# Altium footprint library FootPrintLib_11.PcbLib: 376 footprints (part 4 of 24)
Each footprint in its own frame and in the unit in brackets; x right, y up, seen from the top. Pads: shape width x height; smd on the part's side, far side on the other; paste and mask are expansions set on the pad; w line width, h text height; cw(c..) or ccw(c..) is an arc to the next point about the centre after c.
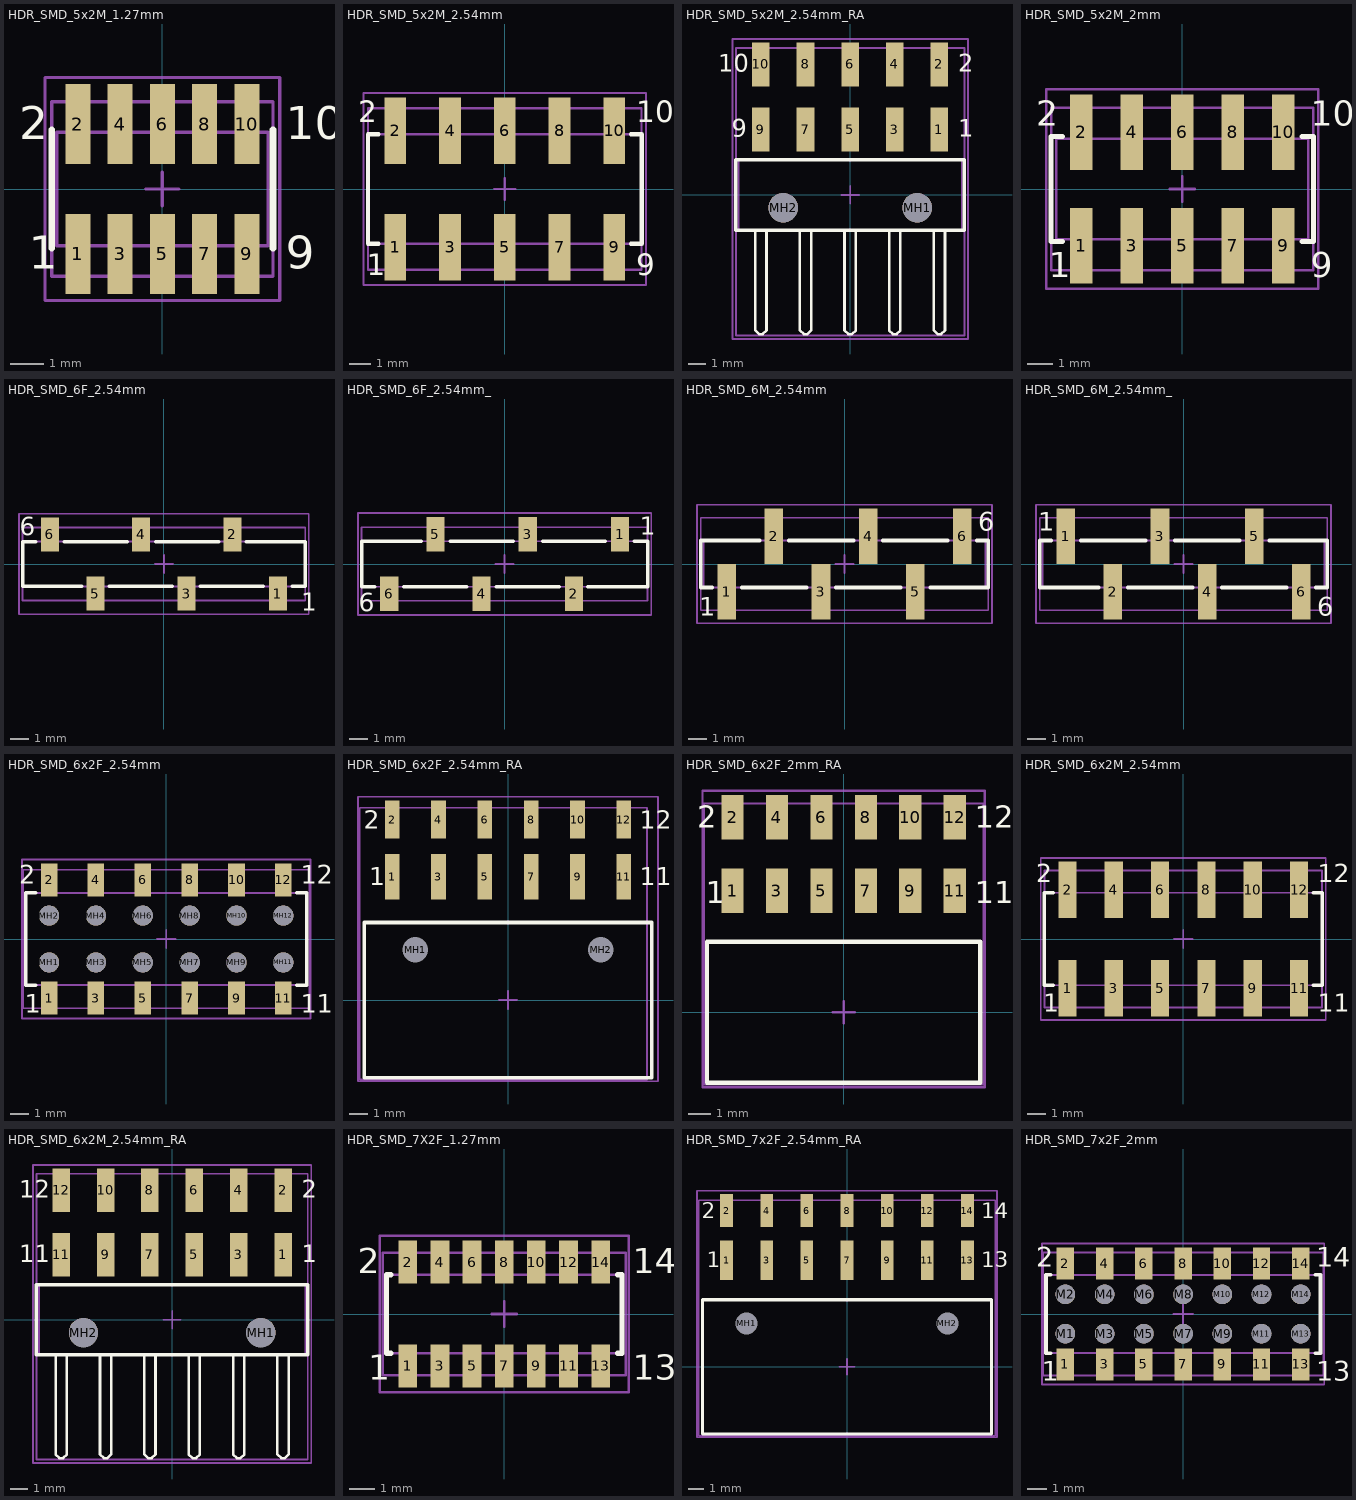
[diagram p3: the footprints below, top view; thin cyan lines are the x and y axes]

## HDR_SMD_5x2M_1.27mm [mm] "Pin Header, pitch 1.27 mm, SMD, Vertical, dual row, 10p"
height 6.55
pads (10):
  rect 0.75x2.4 smd: 1(-2.54,-1.95) 2(-2.54,1.95) 3(-1.27,-1.95) 4(-1.27,1.95) 5(0,-1.95) 6(0,1.95) 7(1.27,-1.95) 8(1.27,1.95) 9(2.54,-1.95) 10(2.54,1.95)
Top Overlay:
  lines w0.2: -3.325,-1.775 -3.325,1.775 ; 3.325,-1.775 3.325,1.775
  text "2" at -4.305,1.5 h1
  text "1" at -4.005,-2.4 h1
  text "9" at 3.705,-2.4 h1
  text "10" at 3.705,1.5 h1
Mechanical 11:
  lines w0.1: -3.175,-1.7 3.175,-1.7 3.175,1.7 -3.175,1.7 -3.175,-1.7
Mechanical 13:
  lines w0.1: -3.325,-2.625 -3.325,2.625 3.325,2.625 3.325,-2.625 -3.325,-2.625
Mechanical 15:
  lines w0.1: -0.5,0 0.5,0 ; 0,-0.5 0,0.5 ; -3.525,-3.35 3.525,-3.35 3.525,3.35 -3.525,3.35 -3.525,-3.35
3D body "62101021021.stp": height 5.9, standoff -0.01, extent -3.175,-2.5 3.175,2.5

## HDR_SMD_5x2M_2.54mm [mm] "Pin Header, pitch 2.54 mm, SMD, Vertical, dual row, 10p"
height 9.6
pads (10):
  rect 1x3.1 smd: 1(-5.08,-2.7) 2(-5.08,2.7) 3(-2.54,-2.7) 4(-2.54,2.7) 5(0,-2.7) 6(0,2.7) 7(2.54,-2.7) 8(2.54,2.7) 9(5.08,-2.7) 10(5.08,2.7)
Top Overlay:
  lines w0.2: -5.86,-2.54 -6.35,-2.54 -6.35,2.54 -5.86,2.54 ; 5.86,-2.54 6.35,-2.54 6.35,2.54 5.86,2.54
  text "10" at 6.11,3.1 h1
  text "9" at 6.11,-4 h1
  text "1" at -6.41,-4 h1
  text "2" at -6.81,3.1 h1
Mechanical 11:
  lines w0.1: -6.35,-2.54 6.35,-2.54 6.35,2.54 -6.35,2.54 -6.35,-2.54
Mechanical 13:
  lines w0.1: -6.35,-3.75 -6.35,3.75 6.35,3.75 6.35,-3.75 -6.35,-3.75
Mechanical 15:
  lines w0.1: -0.5,0 0.5,0 ; 0,-0.5 0,0.5 ; -6.55,-4.45 -6.55,4.45 6.55,4.45 6.55,-4.45 -6.55,-4.45
3D body "61001021121.stp": height 9.62, standoff 0.02, extent -6.35,-3.75 6.35,3.75

## HDR_SMD_5x2M_2.54mm_RA [mm] "Pin Header, pitch 2.54 mm, SMD, Angled, dual row, 10p"
height 5.08
pads (12):
  rect 1x2.5 smd: 1(5.08,3.72) 2(5.08,7.42) 3(2.54,3.72) 4(2.54,7.42) 5(0,3.72) 6(0,7.42) 7(-2.54,3.72) 8(-2.54,7.42) 9(-5.08,3.72) 10(-5.08,7.42)
  round 1.68 hole 1.68 unplated: MH1(3.81,-0.73) MH2(-3.81,-0.73)
Top Overlay:
  lines w0.15: -5.4,-2 -5.4,-7.3 -5.4,-7.58 -5.4,-7.705 -5.18,-7.925 -4.98,-7.925 -4.76,-7.705 -4.76,-7.58 -4.76,-7.3 -4.76,-2 ; -2.86,-2 -2.86,-7.3 -2.86,-7.58 -2.86,-7.705 -2.64,-7.925 -2.44,-7.925 -2.22,-7.705 -2.22,-7.58 -2.22,-7.3 -2.22,-2 ; -0.32,-2 -0.32,-7.3 -0.32,-7.58 -0.32,-7.705 -0.1,-7.925 0.1,-7.925 0.32,-7.705 0.32,-7.58 0.32,-7.3 0.32,-2 ; 2.22,-2 2.22,-7.3 2.22,-7.58 2.22,-7.705 2.44,-7.925 2.64,-7.925 2.86,-7.705 2.86,-7.58 2.86,-7.3 2.86,-2 ; 4.76,-2 4.76,-7.3 4.76,-7.58 4.76,-7.705 4.98,-7.925 5.18,-7.925 5.4,-7.705 5.4,-7.58 5.4,-7.3 5.4,-2
  lines w0.2: -6.5,-2 6.5,-2 6.5,2 -6.5,2 -6.5,-2
  text "1" at 6.14,3.3 h1
  text "2" at 6.14,7 h1
  text "10" at -7.5,7 h1
  text "9" at -6.74,3.3 h1
Mechanical 11:
  lines w0.1: -6.35,-2 6.35,-2 6.35,2 -6.35,2 -6.35,-2
Mechanical 13:
  lines w0.1: -6.5,-8 6.5,-8 6.5,8.36 -6.5,8.36 -6.5,-8
Mechanical 15:
  lines w0.1: -0.5,0 0.5,0 ; 0,-0.5 0,0.5 ; -6.7,-8.2 -6.7,8.87 6.7,8.87 6.7,-8.2 -6.7,-8.2
3D body "610110249121.stp": height 5.1, standoff -1.38, extent -6.35,-8 6.35,8.16

## HDR_SMD_5x2M_2mm [mm] "Pin Header, pitch 2.00 mm, SMD, Vertical, dual row, 10p"
height 6.8
pads (10):
  rect 0.89x3 smd: 1(-4,-2.25) 2(-4,2.25) 3(-2,-2.25) 4(-2,2.25) 5(0,-2.25) 6(0,2.25) 7(2,-2.25) 8(2,2.25) 9(4,-2.25) 10(4,2.25)
Top Overlay:
  lines w0.2: -4.75,-2.075 -5.2,-2.075 -5.2,2.075 -4.75,2.075 ; 4.75,-2.075 5.2,-2.075 5.2,2.075 4.75,2.075
  text "9" at 5.1,-3.5 h1
  text "10" at 5.1,2.5 h1
  text "1" at -5.3,-3.5 h1
  text "2" at -5.8,2.5 h1
Mechanical 11:
  lines w0.1: -5,-2 5,-2 5,2 -5,2 -5,-2
Mechanical 13:
  lines w0.1: -5.2,-3.225 -5.2,3.225 5.2,3.225 5.2,-3.225 -5.2,-3.225
Mechanical 15:
  lines w0.1: -0.5,0 0.5,0 ; 0,-0.5 0,0.5 ; -5.4,-3.95 -5.4,3.95 5.4,3.95 5.4,-3.95 -5.4,-3.95
3D body "62101021921.stp": height 6.7, standoff 0, extent -5,-3.1 5,3.1

## HDR_SMD_6F_2.54mm [mm] "Socket Header, Pitch 2.54 mm, SMT, Vertical, single row, 6p"
height 7.5
pads (6):
  rect 1x1.91 smd: 1(6.35,-1.645) 2(3.81,1.645) 3(1.27,-1.645) 4(-1.27,1.645) 5(-3.81,-1.645) 6(-6.35,1.645)
Top Overlay:
  lines w0.2: -7.14,1.25 -7.87,1.25 -7.87,-1.25 -4.59,-1.25 ; -5.54,1.25 -2.04,1.25 ; -3.04,-1.25 0.46,-1.25 ; -0.46,1.25 3.04,1.25 ; 2.04,-1.25 5.54,-1.25 ; 4.59,1.25 7.87,1.25 7.87,-1.25 7.14,-1.25
  text "1" at 7.64,-2.6 h1
  text "6" at -8.04,1.6 h1
Mechanical 11:
  lines w0.1: -7.87,-1.25 -7.87,1.25 7.87,1.25 7.87,-1.25 -7.87,-1.25
Mechanical 13:
  lines w0.1: -7.87,-2.025 -7.87,2.025 7.87,2.025 7.87,-2.025 -7.87,-2.025
Mechanical 15:
  lines w0.1: -0.5,0 0.5,0 ; 0,-0.5 0,0.5 ; -8.07,-2.8 -8.07,2.8 8.07,2.8 8.07,-2.8 -8.07,-2.8
3D body "61000611921.stp": height 7.5, standoff 0, extent -7.87,-2.025 7.87,2.025

## HDR_SMD_6F_2.54mm_ [mm] "Socket Header, Pitch 2.54 mm, SMT, Vertical, single row, 6p"
height 7.5
pads (6):
  rect 1x1.91 smd: 1(6.35,1.645) 2(3.81,-1.645) 3(1.27,1.645) 4(-1.27,-1.645) 5(-3.81,1.645) 6(-6.35,-1.645)
Top Overlay:
  lines w0.2: -7.14,-1.25 -7.87,-1.25 -7.87,1.25 -4.59,1.25 ; -5.54,-1.25 -2.09,-1.25 ; -2.99,1.25 0.46,1.25 ; -0.46,-1.25 2.99,-1.25 ; 2.09,1.25 5.54,1.25 ; 4.59,-1.25 7.87,-1.25 7.87,1.25 7.14,1.25
  text "6" at -8.04,-2.6 h1
  text "1" at 7.44,1.6 h1
Mechanical 11:
  lines w0.1: -7.87,-1.25 -7.87,1.25 7.87,1.25 7.87,-1.25 -7.87,-1.25
Mechanical 13:
  lines w0.1: -7.87,-2.025 7.87,-2.025 7.87,2.025 -7.87,2.025 -7.87,-2.025
Mechanical 15:
  lines w0.1: -0.5,0 0.5,0 ; 0,-0.5 0,0.5 ; -8.07,-2.8 8.07,-2.8 8.07,2.8 -8.07,2.8 -8.07,-2.8
3D body "61000613321.stp": height 7.5, standoff 0, extent -7.87,-2.025 7.87,2.025

## HDR_SMD_6M_2.54mm [mm] "Pin Header, pitch 2.54 mm, SMD, Vertical, single row, 6p"
height 9.3
pads (6):
  rect 1x3 smd: 1(-6.35,-1.5) 2(-3.81,1.5) 3(-1.27,-1.5) 4(1.27,1.5) 5(3.81,-1.5) 6(6.35,1.5)
Top Overlay:
  lines w0.2: -7.14,-1.27 -7.77,-1.27 -7.77,1.27 -4.59,1.27 ; -5.54,-1.27 -2.04,-1.27 ; -3,1.27 0.5,1.27 ; -0.46,-1.27 3.04,-1.27 ; 2.08,1.27 5.58,1.27 ; 4.64,-1.27 7.77,-1.27 7.77,1.27 7.14,1.27
  text "1" at -7.84,-2.8 h1
  text "6" at 7.24,1.8 h1
Mechanical 11:
  lines w0.1: -7.62,-1.27 -7.62,1.27 7.62,1.27 7.62,-1.27 -7.62,-1.27
Mechanical 13:
  lines w0.1: -7.77,-2.5 7.77,-2.5 7.77,2.5 -7.77,2.5 -7.77,-2.5
Mechanical 15:
  lines w0.1: -0.5,0 0.5,0 ; 0,-0.5 0,0.5 ; -7.97,-3.2 7.97,-3.2 7.97,3.2 -7.97,3.2 -7.97,-3.2
3D body "61000618221.stp": height 9.33, standoff 0, extent -7.62,-2.5 7.62,2.5

## HDR_SMD_6M_2.54mm_ [mm] "Pin Header, pitch 2.54 mm, SMD, Vertical, single row, 6p"
height 9.3
pads (6):
  rect 1x3 smd: 1(-6.35,1.5) 2(-3.81,-1.5) 3(-1.27,1.5) 4(1.27,-1.5) 5(3.81,1.5) 6(6.35,-1.5)
Top Overlay:
  lines w0.2: -7.14,1.27 -7.77,1.27 -7.77,-1.27 -4.59,-1.27 ; -5.54,1.27 -2.04,1.27 ; -3,-1.27 0.5,-1.27 ; -0.46,1.27 3.04,1.27 ; 2.08,-1.27 5.58,-1.27 ; 4.64,1.27 7.77,1.27 7.77,-1.27 7.14,-1.27
  text "6" at 7.24,-2.8 h1
  text "1" at -7.84,1.8 h1
Mechanical 11:
  lines w0.1: -7.62,-1.27 -7.62,1.27 7.62,1.27 7.62,-1.27 -7.62,-1.27
Mechanical 13:
  lines w0.1: -7.77,-2.5 7.77,-2.5 7.77,2.5 -7.77,2.5 -7.77,-2.5
Mechanical 15:
  lines w0.1: -0.5,0 0.5,0 ; 0,-0.5 0,0.5 ; -7.97,-3.2 7.97,-3.2 7.97,3.2 -7.97,3.2 -7.97,-3.2
3D body "61000618321.stp": height 9.37, standoff 0.04, extent -7.62,-2.5 7.62,2.5

## HDR_SMD_6x2F_2.54mm [mm] "Socket Header, Pitch 2.54 mm, SMT, Vertical, dual row, 12p"
height 3.7
pads (24):
  rect 0.9x1.8 smd: 1(-6.35,-3.2) 2(-6.35,3.2) 3(-3.81,-3.2) 4(-3.81,3.2) 5(-1.27,-3.2) 6(-1.27,3.2) 7(1.27,-3.2) 8(1.27,3.2) 9(3.81,-3.2) 10(3.81,3.2) 11(6.35,-3.2) 12(6.35,3.2)
  round 1.1 hole 1.1 unplated: MH1(-6.35,-1.27) MH2(-6.35,1.27) MH3(-3.81,-1.27) MH4(-3.81,1.27) MH5(-1.27,-1.27) MH6(-1.27,1.27) MH7(1.27,-1.27) MH8(1.27,1.27) MH9(3.81,-1.27) MH10(3.81,1.27) MH11(6.35,-1.27) MH12(6.35,1.27)
Top Overlay:
  lines w0.2: -7.08,-2.5 -7.62,-2.5 -7.62,2.5 -7.08,2.5 ; 7.08,-2.5 7.62,-2.5 7.62,2.5 7.08,2.5
  text "11" at 7.28,-4 h1
  text "12" at 7.28,3 h1
  text "1" at -7.68,-4 h1
  text "2" at -7.98,3 h1
Mechanical 11:
  lines w0.1: -7.62,-2.5 -7.62,2.5 7.62,2.5 7.62,-2.5 -7.62,-2.5
Mechanical 13:
  lines w0.1: -7.77,-3.75 -7.77,3.75 7.77,3.75 7.77,-3.75 -7.77,-3.75
Mechanical 15:
  lines w0.1: -0.5,0 0.5,0 ; 0,-0.5 0,0.5 ; -7.82,-4.3 -7.82,4.3 7.82,4.3 7.82,-4.3 -7.82,-4.3
3D body "610012243021.stp": height 3.7, standoff 0, extent -7.62,-3.603 7.62,3.603

## HDR_SMD_6x2F_2.54mm_RA [mm] "Socket Header, Pitch 2.54 mm, SMT, Angled, dual row, 12p"
height 5.2
pads (14):
  rect 0.8x2.5 smd: 1(-6.35,6.76) 3(-3.81,6.76) 5(-1.27,6.76) 7(1.27,6.76) 9(3.81,6.76) 11(6.35,6.76)
  rect 0.8x2.1 smd: 2(-6.35,9.89) 4(-3.81,9.89) 6(-1.27,9.89) 8(1.27,9.89) 10(3.81,9.89) 12(6.35,9.89)
  round 1.3 hole 1.4 unplated: MH1(-5.08,2.75) MH2(5.08,2.75)
Top Overlay:
  lines w0.2: -7.87,-4.25 -7.87,4.25 7.87,4.25 7.87,-4.25 -7.87,-4.25
  text "2" at -7.91,9.4 h1
  text "1" at -7.61,6.3 h1
  text "11" at 7.21,6.3 h1
  text "12" at 7.21,9.4 h1
Mechanical 11:
  lines w0.1: -7.87,-4.25 -7.87,4.25 7.87,4.25 7.87,-4.25 -7.87,-4.25
Mechanical 13:
  lines w0.1: -8.12,-4.35 -8.12,10.54 7.62,10.54 7.62,-4.35 -8.12,-4.35
Mechanical 15:
  lines w0.1: -0.5,0 0.5,0 ; 0,-0.5 0,0.5 ; -8.22,-4.45 -8.22,11.14 8.22,11.14 8.22,-4.45 -8.22,-4.45
3D body "610112249221.stp": height 5.03, standoff -1.27, extent -7.87,-4.25 7.87,10.44

## HDR_SMD_6x2F_2mm_RA [mm] "Socket Header, Pitch 2.00 mm, SMT, Angled, dual row, 12p"
height 4.15
pads (12):
  rect 1x2 smd: 1(-5,5.475) 2(-5,8.775) 3(-3,5.475) 4(-3,8.775) 5(-1,5.475) 6(-1,8.775) 7(1,5.475) 8(1,8.775) 9(3,5.475) 10(3,8.775) 11(5,5.475) 12(5,8.775)
Top Overlay:
  lines w0.2: -6.15,-3.175 -6.15,3.175 6.15,3.175 6.15,-3.175 -6.15,-3.175
  text "1" at -6.2,4.9 h1
  text "2" at -6.6,8.3 h1
  text "12" at 5.9,8.3 h1
  text "11" at 5.9,4.9 h1
Mechanical 11:
  lines w0.1: -6.15,-3.175 6.15,-3.175 6.15,3.175 -6.15,3.175 -6.15,-3.175
Mechanical 13:
  lines w0.1: -6.3,-3.25 -6.3,9.4 6.3,9.4 6.3,-3.25 -6.3,-3.25
Mechanical 15:
  lines w0.1: -0.5,0 0.5,0 ; 0,-0.5 0,0.5 ; -6.35,-3.375 6.35,-3.375 6.35,9.975 -6.35,9.975 -6.35,-3.375
3D body "621112284621.stp": height 4.05, standoff 0.05, extent -6.15,-3.175 6.15,9.275

## HDR_SMD_6x2M_2.54mm [mm] "Pin Header, pitch 2.54 mm, SMD, Vertical, dual row, 12p"
height 9.6
pads (12):
  rect 1x3.1 smd: 1(-6.35,-2.7) 2(-6.35,2.7) 3(-3.81,-2.7) 4(-3.81,2.7) 5(-1.27,-2.7) 6(-1.27,2.7) 7(1.27,-2.7) 8(1.27,2.7) 9(3.81,-2.7) 10(3.81,2.7) 11(6.35,-2.7) 12(6.35,2.7)
Top Overlay:
  lines w0.2: -7.13,-2.54 -7.62,-2.54 -7.62,2.54 -7.13,2.54 ; 7.13,-2.54 7.62,-2.54 7.62,2.54 7.13,2.54
  text "12" at 7.38,3.1 h1
  text "11" at 7.38,-4 h1
  text "1" at -7.68,-4 h1
  text "2" at -8.08,3.1 h1
Mechanical 11:
  lines w0.1: -7.62,-2.54 7.62,-2.54 7.62,2.54 -7.62,2.54 -7.62,-2.54
Mechanical 13:
  lines w0.1: -7.62,-3.75 -7.62,3.75 7.62,3.75 7.62,-3.75 -7.62,-3.75
Mechanical 15:
  lines w0.1: -0.5,0 0.5,0 ; 0,-0.5 0,0.5 ; -7.82,-4.45 -7.82,4.45 7.82,4.45 7.82,-4.45 -7.82,-4.45
3D body "61001221121.stp": height 9.62, standoff 0.02, extent -7.62,-3.75 7.62,3.75

## HDR_SMD_6x2M_2.54mm_RA [mm] "Pin Header, pitch 2.54 mm, SMD, Angled, dual row, 12p"
height 5.08
pads (14):
  rect 1x2.5 smd: 1(6.35,3.72) 2(6.35,7.42) 3(3.81,3.72) 4(3.81,7.42) 5(1.27,3.72) 6(1.27,7.42) 7(-1.27,3.72) 8(-1.27,7.42) 9(-3.81,3.72) 10(-3.81,7.42) 11(-6.35,3.72) 12(-6.35,7.42)
  round 1.68 hole 1.68 unplated: MH1(5.08,-0.73) MH2(-5.08,-0.73)
Top Overlay:
  lines w0.15: -6.67,-2 -6.67,-7.3 -6.67,-7.58 -6.67,-7.705 -6.45,-7.925 -6.25,-7.925 -6.03,-7.705 -6.03,-7.58 -6.03,-7.3 -6.03,-2 ; -4.13,-2 -4.13,-7.3 -4.13,-7.58 -4.13,-7.705 -3.91,-7.925 -3.71,-7.925 -3.49,-7.705 -3.49,-7.58 -3.49,-7.3 -3.49,-2 ; -1.59,-2 -1.59,-7.3 -1.59,-7.58 -1.59,-7.705 -1.37,-7.925 -1.17,-7.925 -0.95,-7.705 -0.95,-7.58 -0.95,-7.3 -0.95,-2 ; 0.95,-2 0.95,-7.3 0.95,-7.58 0.95,-7.705 1.17,-7.925 1.37,-7.925 1.59,-7.705 1.59,-7.58 1.59,-7.3 1.59,-2 ; 3.49,-2 3.49,-7.3 3.49,-7.58 3.49,-7.705 3.71,-7.925 3.91,-7.925 4.13,-7.705 4.13,-7.58 4.13,-7.3 4.13,-2 ; 6.03,-2 6.03,-7.3 6.03,-7.58 6.03,-7.705 6.25,-7.925 6.45,-7.925 6.67,-7.705 6.67,-7.58 6.67,-7.3 6.67,-2
  lines w0.2: -7.77,-2 7.77,-2 7.77,2 -7.77,2 -7.77,-2
  text "1" at 7.41,3.3 h1
  text "2" at 7.41,7 h1
  text "11" at -8.77,3.3 h1
  text "12" at -8.77,7 h1
Mechanical 11:
  lines w0.1: -7.62,-2 7.62,-2 7.62,2 -7.62,2 -7.62,-2
Mechanical 13:
  lines w0.1: -7.77,-8 7.77,-8 7.77,8.36 -7.77,8.36 -7.77,-8
Mechanical 15:
  lines w0.1: -0.5,0 0.5,0 ; 0,-0.5 0,0.5 ; -7.97,-8.2 -7.97,8.87 7.97,8.87 7.97,-8.2 -7.97,-8.2
3D body "610112249121.stp": height 5.1, standoff -1.38, extent -7.62,-8 7.62,8.16

## HDR_SMD_7X2F_1.27mm [mm] "Socket Header, Pitch 1.27 mm, SMT, Vertical, dual row, 14p"
height 4.7
pads (14):
  rect 0.74x1.7 smd: 1(-3.81,-2.05) 2(-3.81,2.05) 3(-2.54,-2.05) 4(-2.54,2.05) 5(-1.27,-2.05) 6(-1.27,2.05) 7(0,-2.05) 8(0,2.05) 9(1.27,-2.05) 10(1.27,2.05) 11(2.54,-2.05) 12(2.54,2.05) 13(3.81,-2.05) 14(3.81,2.05)
Top Overlay:
  lines w0.2: -4.475,-1.55 -4.645,-1.55 -4.645,1.55 -4.475,1.55 ; 4.475,-1.55 4.645,-1.55 4.645,1.55 4.475,1.55
  text "1" at -5.375,-2.6 h1
  text "2" at -5.775,1.6 h1
  text "13" at 5.075,-2.6 h1
  text "14" at 5.075,1.6 h1
Mechanical 11:
  lines w0.1: -4.645,-1.55 4.645,-1.55 4.645,1.55 -4.645,1.55 -4.645,-1.55
Mechanical 13:
  lines w0.1: -4.795,-2.425 -4.795,2.425 4.795,2.425 4.795,-2.425 -4.795,-2.425
Mechanical 15:
  lines w0.1: -0.5,0 0.5,0 ; 0,-0.5 0,0.5 ; -4.925,-3.1 -4.925,3.1 4.925,3.1 4.925,-3.1 -4.925,-3.1
3D body "62301421021.stp": height 4.6, standoff 0, extent -4.645,-2.299 4.645,2.299

## HDR_SMD_7x2F_2.54mm_RA [mm] "Socket Header, Pitch 2.54 mm, SMT, Angled, dual row, 14p"
height 5.2
pads (16):
  rect 0.8x2.5 smd: 1(-7.62,6.76) 3(-5.08,6.76) 5(-2.54,6.76) 7(0,6.76) 9(2.54,6.76) 11(5.08,6.76) 13(7.62,6.76)
  rect 0.8x2.1 smd: 2(-7.62,9.89) 4(-5.08,9.89) 6(-2.54,9.89) 8(0,9.89) 10(2.54,9.89) 12(5.08,9.89) 14(7.62,9.89)
  round 1.3 hole 1.4 unplated: MH1(-6.35,2.75) MH2(6.35,2.75)
Top Overlay:
  lines w0.2: -9.14,-4.25 9.14,-4.25 9.14,4.25 -9.14,4.25 -9.14,-4.25
  text "13" at 8.48,6.3 h1
  text "14" at 8.48,9.4 h1
  text "1" at -8.88,6.3 h1
  text "2" at -9.18,9.4 h1
Mechanical 11:
  lines w0.1: -9.14,-4.25 9.14,-4.25 9.14,4.25 -9.14,4.25 -9.14,-4.25
Mechanical 13:
  lines w0.1: -9.39,-4.35 9.39,-4.35 9.39,10.54 -9.39,10.54 -9.39,-4.35
Mechanical 15:
  lines w0.1: -0.5,0 0.5,0 ; 0,-0.5 0,0.5 ; -9.49,-4.45 9.49,-4.45 9.49,11.14 -9.49,11.14 -9.49,-4.45
3D body "610114249221.stp": height 5.03, standoff -1.27, extent -9.14,-4.25 9.14,10.44

## HDR_SMD_7x2F_2mm [mm] "Socket Header, Pitch 2.00 mm, SMT, Vertical, dual row, 14p"
height 2.35
pads (28):
  rect 0.89x1.65 smd: 1(-6,-2.575) 2(-6,2.575) 3(-4,-2.575) 4(-4,2.575) 5(-2,-2.575) 6(-2,2.575) 7(0,-2.575) 8(0,2.575) 9(2,-2.575) 10(2,2.575) 11(4,-2.575) 12(4,2.575) 13(6,-2.575) 14(6,2.575)
  round 1 hole 1 unplated: M1(-6,-1) M2(-6,1) M3(-4,-1) M4(-4,1) M5(-2,-1) M6(-2,1) M7(0,-1) M8(0,1) M9(2,-1) M10(2,1) M11(4,-1) M12(4,1) M13(6,-1) M14(6,1)
Top Overlay:
  lines w0.2: -6.75,-2 -7,-2 -7,2 -6.75,2 ; 6.75,-2 7,-2 7,2 6.75,2
  text "14" at 6.8,2.4 h1
  text "13" at 6.8,-3.4 h1
  text "2" at -7.5,2.4 h1
  text "1" at -7.2,-3.4 h1
Mechanical 11:
  lines w0.1: -7,-2 -7,2 7,2 7,-2 -7,-2
Mechanical 13:
  lines w0.1: -7.15,-3.125 -7.15,3.125 7.15,3.125 7.15,-3.125 -7.15,-3.125
Mechanical 15:
  lines w0.1: -0.5,0 0.5,0 ; 0,-0.5 0,0.5 ; -7.2,-3.6 -7.2,3.6 7.2,3.6 7.2,-3.6 -7.2,-3.6
3D body "62101421821.stp": height 2.1, standoff 0, extent -7,-3 7,3